# Altium footprint library 2019-09-16_09-55-57.PcbLib: 3 footprints
Each footprint in its own frame and in the unit in brackets; x right, y up, seen from the top. Pads: shape width x height; smd on the part's side, far side on the other; paste and mask are expansions set on the pad; w line width, h text height; cw(c..) or ccw(c..) is an arc to the next point about the centre after c.
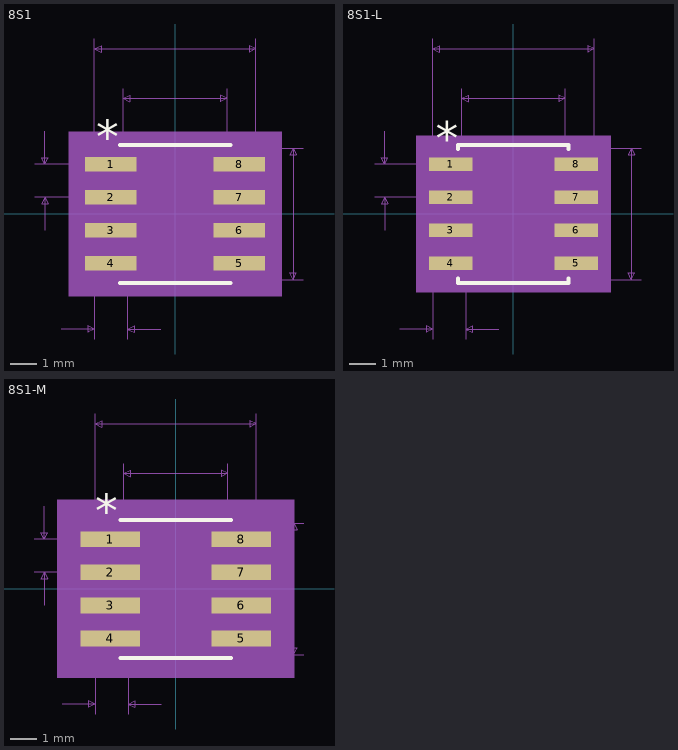
[diagram p0: the footprints below, top view; thin cyan lines are the x and y axes]

## 8S1 [mil]
pads (8):
  rect 78x22.08 smd paste+0 mask+0: 1(-97.05,75) 2(-97.05,25) 3(-97.05,-25) 4(-97.05,-75) 5(97.05,-75) 6(97.05,-25) 7(97.05,25) 8(97.05,75)
Top Overlay:
  lines w6: -83.54,-104.41 83.54,-104.41 ; -83.54,104.41 83.54,104.41
  text "*" at -119.55,92.08 h50
Mechanical 5:
  region: 161.05,-124.41 -161.05,-124.41 -161.05,124.41 161.05,124.41
Mechanical 7:
  lines w1: -212.05,25 -97.05,25 ; -212.05,75 -97.05,75 ; -197.05,-25 -197.05,25 ; -197.05,125 -197.05,75 ; -172.05,-174.41 -122.05,-174.41 ; -122.05,-189.41 -122.05,0 -122.05,264.41 ; -78.54,0 -78.54,189.41 ; -72.05,-189.41 -72.05,0 ; -22.05,-174.41 -72.05,-174.41 ; 0,-99.41 193.54,-99.41 ; 0,99.41 193.54,99.41 ; 78.54,0 78.54,189.41 ; 122.05,0 122.05,264.41 ; -197.05,25 -202.05,15 -192.05,15 -197.05,25 ; -197.05,75 -202.05,85 -192.05,85 -197.05,75 ; -122.05,-174.41 -132.05,-169.41 -132.05,-179.41 -122.05,-174.41 ; -122.05,249.41 122.05,249.41 ; -122.05,249.41 -112.05,254.41 -112.05,244.41 -122.05,249.41 ; -78.54,174.41 78.54,174.41 ; -78.54,174.41 -68.54,179.41 -68.54,169.41 -78.54,174.41 ; -72.05,-174.41 -62.05,-169.41 -62.05,-179.41 -72.05,-174.41 ; 78.54,174.41 68.54,179.41 68.54,169.41 78.54,174.41 ; 122.05,249.41 112.05,254.41 112.05,244.41 122.05,249.41 ; 178.54,-99.41 178.54,99.41 ; 178.54,-99.41 173.54,-89.41 183.54,-89.41 178.54,-99.41 ; 178.54,99.41 173.54,89.41 183.54,89.41 178.54,99.41
  text "Default Padstyle: RX78Y22p08D0T" at -387.5,-299.41 h50
  text "Pin One Padstyle: RX78Y22p08D0T" at -387.5,-359.41 h50
  text "Alt 1 Padstyle: OX60Y90D30P" at -337.5,-539.41 h50
  text "Alt 2 Padstyle: OX90Y60D30P" at -337.5,-599.41 h50
  text "0.157in/3.99mm" at -87.5,194.41 h25
  text "0.244in/6.2mm" at -81.25,269.41 h25
  text "0.199in/5.05mm" at 198.54,-12.5 h25
  text "0.05in/1.27mm" at -379.55,37.5 h25
  text "0.05in/1.27mm" at -178.3,-219.41 h25
Mechanical 13:
  lines w0: -12,99.41 ccw(c0,99.41) 12,99.41
  lines w1: -122.05,-85.04 -122.05,-64.96 -78.54,-64.96 -78.54,-85.04 -122.05,-85.04 ; -122.05,-35.04 -122.05,-14.96 -78.54,-14.96 -78.54,-35.04 -122.05,-35.04 ; -122.05,14.96 -122.05,35.04 -78.54,35.04 -78.54,14.96 -122.05,14.96 ; -122.05,64.96 -122.05,85.04 -78.54,85.04 -78.54,64.96 -122.05,64.96 ; -78.54,-99.41 78.54,-99.41 78.54,99.41 -78.54,99.41 -78.54,-99.41 ; 78.54,-85.04 78.54,-64.96 122.05,-64.96 122.05,-85.04 78.54,-85.04 ; 78.54,-35.04 78.54,-14.96 122.05,-14.96 122.05,-35.04 78.54,-35.04 ; 78.54,14.96 78.54,35.04 122.05,35.04 122.05,14.96 78.54,14.96 ; 78.54,64.96 78.54,85.04 122.05,85.04 122.05,64.96 78.54,64.96
  text "*" at -76.04,46.41 h50
Mechanical 15:
  region: -88.54,-96.04 -146.05,-96.04 -146.05,96.04 -88.54,96.04 -88.54,109.41 88.54,109.41 88.54,96.04 146.05,96.04 146.05,-96.04 88.54,-96.04 88.54,-109.41 -88.54,-109.41
  lines w6: -146.05,-96.04 -146.05,96.04 -88.54,96.04 -88.54,109.41 88.54,109.41 88.54,96.04 146.05,96.04 146.05,-96.04 88.54,-96.04 88.54,-109.41 -88.54,-109.41 -88.54,-96.04 -146.05,-96.04
3D body: height 10, standoff 0, extent 0,0 10,10

## 8S1-L [mil]
pads (8):
  rect 66x20.08 smd paste+0 mask+0: 1(-95.05,75) 2(-95.05,25) 3(-95.05,-25) 4(-95.05,-75) 5(95.05,-75) 6(95.05,-25) 7(95.05,25) 8(95.05,75)
Top Overlay:
  lines w6: -83.54,-98.14 -83.54,-104.41 83.54,-104.41 83.54,-98.14 ; -83.54,98.14 -83.54,104.41 83.54,104.41 83.54,98.14
  text "*" at -117.55,90.08 h50
Mechanical 5:
  region: 147.05,-118.41 -147.05,-118.41 -147.05,118.41 147.05,118.41
Mechanical 7:
  lines w1: -210.05,25 -95.05,25 ; -210.05,75 -95.05,75 ; -195.05,-25 -195.05,25 ; -195.05,125 -195.05,75 ; -172.05,-174.41 -122.05,-174.41 ; -122.05,-189.41 -122.05,0 -122.05,264.41 ; -78.54,0 -78.54,189.41 ; -72.05,-189.41 -72.05,0 ; -22.05,-174.41 -72.05,-174.41 ; 0,-99.41 193.54,-99.41 ; 0,99.41 193.54,99.41 ; 78.54,0 78.54,189.41 ; 122.05,0 122.05,264.41 ; -195.05,25 -200.05,15 -190.05,15 -195.05,25 ; -195.05,75 -200.05,85 -190.05,85 -195.05,75 ; -122.05,-174.41 -132.05,-169.41 -132.05,-179.41 -122.05,-174.41 ; -122.05,249.41 122.05,249.41 ; -122.05,249.41 -112.05,254.41 -112.05,244.41 -122.05,249.41 ; -78.54,174.41 78.54,174.41 ; -78.54,174.41 -68.54,179.41 -68.54,169.41 -78.54,174.41 ; -72.05,-174.41 -62.05,-169.41 -62.05,-179.41 -72.05,-174.41 ; 78.54,174.41 68.54,179.41 68.54,169.41 78.54,174.41 ; 122.05,249.41 112.05,254.41 112.05,244.41 122.05,249.41 ; 178.54,-99.41 178.54,99.41 ; 178.54,-99.41 173.54,-89.41 183.54,-89.41 178.54,-99.41 ; 178.54,99.41 173.54,89.41 183.54,89.41 178.54,99.41
  text "Default Padstyle: RX66Y20p08D0T" at -387.5,-299.41 h50
  text "Pin One Padstyle: RX66Y20p08D0T" at -387.5,-359.41 h50
  text "Alt 1 Padstyle: OX60Y90D30P" at -337.5,-539.41 h50
  text "Alt 2 Padstyle: OX90Y60D30P" at -337.5,-599.41 h50
  text "0.157in/3.99mm" at -87.5,194.41 h25
  text "0.244in/6.2mm" at -81.25,269.41 h25
  text "0.199in/5.05mm" at 198.54,-12.5 h25
  text "0.05in/1.27mm" at -377.55,37.5 h25
  text "0.05in/1.27mm" at -178.3,-219.41 h25
Mechanical 13:
  lines w0: -12,99.41 ccw(c0,99.41) 12,99.41
  lines w1: -122.05,-85.04 -122.05,-64.96 -78.54,-64.96 -78.54,-85.04 -122.05,-85.04 ; -122.05,-35.04 -122.05,-14.96 -78.54,-14.96 -78.54,-35.04 -122.05,-35.04 ; -122.05,14.96 -122.05,35.04 -78.54,35.04 -78.54,14.96 -122.05,14.96 ; -122.05,64.96 -122.05,85.04 -78.54,85.04 -78.54,64.96 -122.05,64.96 ; -78.54,-99.41 78.54,-99.41 78.54,99.41 -78.54,99.41 -78.54,-99.41 ; 78.54,-85.04 78.54,-64.96 122.05,-64.96 122.05,-85.04 78.54,-85.04 ; 78.54,-35.04 78.54,-14.96 122.05,-14.96 122.05,-35.04 78.54,-35.04 ; 78.54,14.96 78.54,35.04 122.05,35.04 122.05,14.96 78.54,14.96 ; 78.54,64.96 78.54,85.04 122.05,85.04 122.05,64.96 78.54,64.96
  text "*" at -76.04,46.41 h50
Mechanical 15:
  region: -82.54,-89.04 -132.05,-89.04 -132.05,89.04 -82.54,89.04 -82.54,103.41 82.54,103.41 82.54,89.04 132.05,89.04 132.05,-89.04 82.54,-89.04 82.54,-103.41 -82.54,-103.41
  lines w6: -132.05,-89.04 -132.05,89.04 -82.54,89.04 -82.54,103.41 82.54,103.41 82.54,89.04 132.05,89.04 132.05,-89.04 82.54,-89.04 82.54,-103.41 -82.54,-103.41 -82.54,-89.04 -132.05,-89.04
3D body: height 10, standoff 0, extent 0,0 10,10

## 8S1-M [mil]
pads (8):
  rect 90x24.08 smd paste+0 mask+0: 1(-99.05,75) 2(-99.05,25) 3(-99.05,-25) 4(-99.05,-75) 5(99.05,-75) 6(99.05,-25) 7(99.05,25) 8(99.05,75)
Top Overlay:
  lines w6: -83.54,-104.41 83.54,-104.41 ; -83.54,104.41 83.54,104.41
  text "*" at -121.55,94.08 h50
Mechanical 5:
  region: 179.05,-134.41 -179.05,-134.41 -179.05,134.41 179.05,134.41
Mechanical 7:
  lines w1: -214.05,25 -99.05,25 ; -214.05,75 -99.05,75 ; -199.05,-25 -199.05,25 ; -199.05,125 -199.05,75 ; -172.05,-174.41 -122.05,-174.41 ; -122.05,-189.41 -122.05,0 -122.05,264.41 ; -78.54,0 -78.54,189.41 ; -72.05,-189.41 -72.05,0 ; -22.05,-174.41 -72.05,-174.41 ; 0,-99.41 193.54,-99.41 ; 0,99.41 193.54,99.41 ; 78.54,0 78.54,189.41 ; 122.05,0 122.05,264.41 ; -199.05,25 -204.05,15 -194.05,15 -199.05,25 ; -199.05,75 -204.05,85 -194.05,85 -199.05,75 ; -122.05,-174.41 -132.05,-169.41 -132.05,-179.41 -122.05,-174.41 ; -122.05,249.41 122.05,249.41 ; -122.05,249.41 -112.05,254.41 -112.05,244.41 -122.05,249.41 ; -78.54,174.41 78.54,174.41 ; -78.54,174.41 -68.54,179.41 -68.54,169.41 -78.54,174.41 ; -72.05,-174.41 -62.05,-169.41 -62.05,-179.41 -72.05,-174.41 ; 78.54,174.41 68.54,179.41 68.54,169.41 78.54,174.41 ; 122.05,249.41 112.05,254.41 112.05,244.41 122.05,249.41 ; 178.54,-99.41 178.54,99.41 ; 178.54,-99.41 173.54,-89.41 183.54,-89.41 178.54,-99.41 ; 178.54,99.41 173.54,89.41 183.54,89.41 178.54,99.41
  text "Default Padstyle: RX90Y24p08D0T" at -387.5,-299.41 h50
  text "Pin One Padstyle: RX90Y24p08D0T" at -387.5,-359.41 h50
  text "Alt 1 Padstyle: OX60Y90D30P" at -337.5,-539.41 h50
  text "Alt 2 Padstyle: OX90Y60D30P" at -337.5,-599.41 h50
  text "0.157in/3.99mm" at -87.5,194.41 h25
  text "0.244in/6.2mm" at -81.25,269.41 h25
  text "0.199in/5.05mm" at 198.54,-12.5 h25
  text "0.05in/1.27mm" at -381.55,37.5 h25
  text "0.05in/1.27mm" at -178.3,-219.41 h25
Mechanical 13:
  lines w0: -12,99.41 ccw(c0,99.41) 12,99.41
  lines w1: -122.05,-85.04 -122.05,-64.96 -78.54,-64.96 -78.54,-85.04 -122.05,-85.04 ; -122.05,-35.04 -122.05,-14.96 -78.54,-14.96 -78.54,-35.04 -122.05,-35.04 ; -122.05,14.96 -122.05,35.04 -78.54,35.04 -78.54,14.96 -122.05,14.96 ; -122.05,64.96 -122.05,85.04 -78.54,85.04 -78.54,64.96 -122.05,64.96 ; -78.54,-99.41 78.54,-99.41 78.54,99.41 -78.54,99.41 -78.54,-99.41 ; 78.54,-85.04 78.54,-64.96 122.05,-64.96 122.05,-85.04 78.54,-85.04 ; 78.54,-35.04 78.54,-14.96 122.05,-14.96 122.05,-35.04 78.54,-35.04 ; 78.54,14.96 78.54,35.04 122.05,35.04 122.05,14.96 78.54,14.96 ; 78.54,64.96 78.54,85.04 122.05,85.04 122.05,64.96 78.54,64.96
  text "*" at -76.04,46.41 h50
Mechanical 15:
  region: -98.54,-107.04 -164.05,-107.04 -164.05,107.04 -98.54,107.04 -98.54,119.41 98.54,119.41 98.54,107.04 164.05,107.04 164.05,-107.04 98.54,-107.04 98.54,-119.41 -98.54,-119.41
  lines w6: -164.05,-107.04 -164.05,107.04 -98.54,107.04 -98.54,119.41 98.54,119.41 98.54,107.04 164.05,107.04 164.05,-107.04 98.54,-107.04 98.54,-119.41 -98.54,-119.41 -98.54,-107.04 -164.05,-107.04
3D body: height 10, standoff 0, extent 0,0 10,10